# Altium schematic symbol library 50PK10MEFC5X11.SchLib: 1 symbol
Pins are listed as number, name and electrical type; pins without a type are passive.

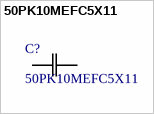
[diagram p0: symbol 50PK10MEFC5X11]

## 50PK10MEFC5X11
designator C?
Description; Manufacturer_Name: Rubycon; Copyright: Copyright (C) 2025 Ultra Librarian. All rights reserved.; Manufacturer_Part_Number: 50PK10MEFC5X11
footprint CAP_PKPZ_5X11_LOW_RUB
pins: 1, 2